# Altium footprint library 5218559F.PcbLib: 1 footprints
Each footprint in its own frame and in the unit in brackets; x right, y up, seen from the top. Pads: shape width x height; smd on the part's side, far side on the other; paste and mask are expansions set on the pad; w line width, h text height; cw(c..) or ccw(c..) is an arc to the next point about the centre after c.
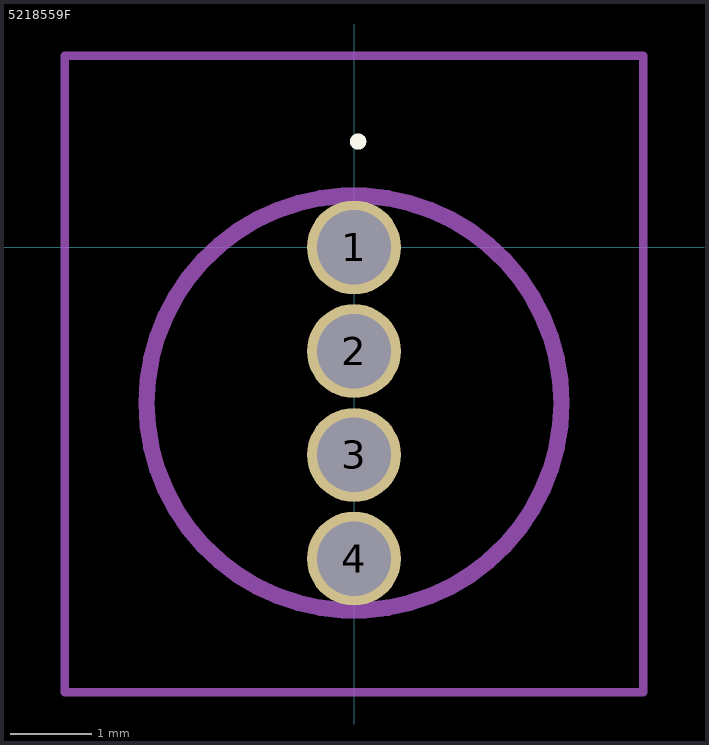
[diagram p0: the footprint, top view; thin cyan lines are the x and y axes]

## 5218559F [mm]
pads (4):
  round 1.15 hole 0.91: 1(0,0) 2(0,-1.27) 3(0,-2.54) 4(0,-3.81)
Top Overlay:
  lines w0.1: 0,1.295 0,1.295 ; 0,1.295 ccw(c0.05,1.295) 0.1,1.295 ; 0,1.295 cw(c0.05,1.295) 0.1,1.295 ; 0.1,1.295 0.1,1.295
Mechanical 15:
  lines w0.2: -2.54,-1.905 -2.54,-1.905 ; -2.54,-1.905 ccw(c0,-1.905) 2.54,-1.905 ; -2.54,-1.905 cw(c0,-1.905) 2.54,-1.905 ; 2.54,-1.905 2.54,-1.905
Mechanical 20:
  lines w0.1: -3.54,-5.445 3.54,-5.445 3.54,2.345 -3.54,2.345 -3.54,-5.445